# Altium footprint library CHIP-Library.PcbLib: 345 footprints (part 21 of 22)
Each footprint in its own frame and in the unit in brackets; x right, y up, seen from the top. Pads: shape width x height; smd on the part's side, far side on the other; paste and mask are expansions set on the pad; w line width, h text height; cw(c..) or ccw(c..) is an arc to the next point about the centre after c.
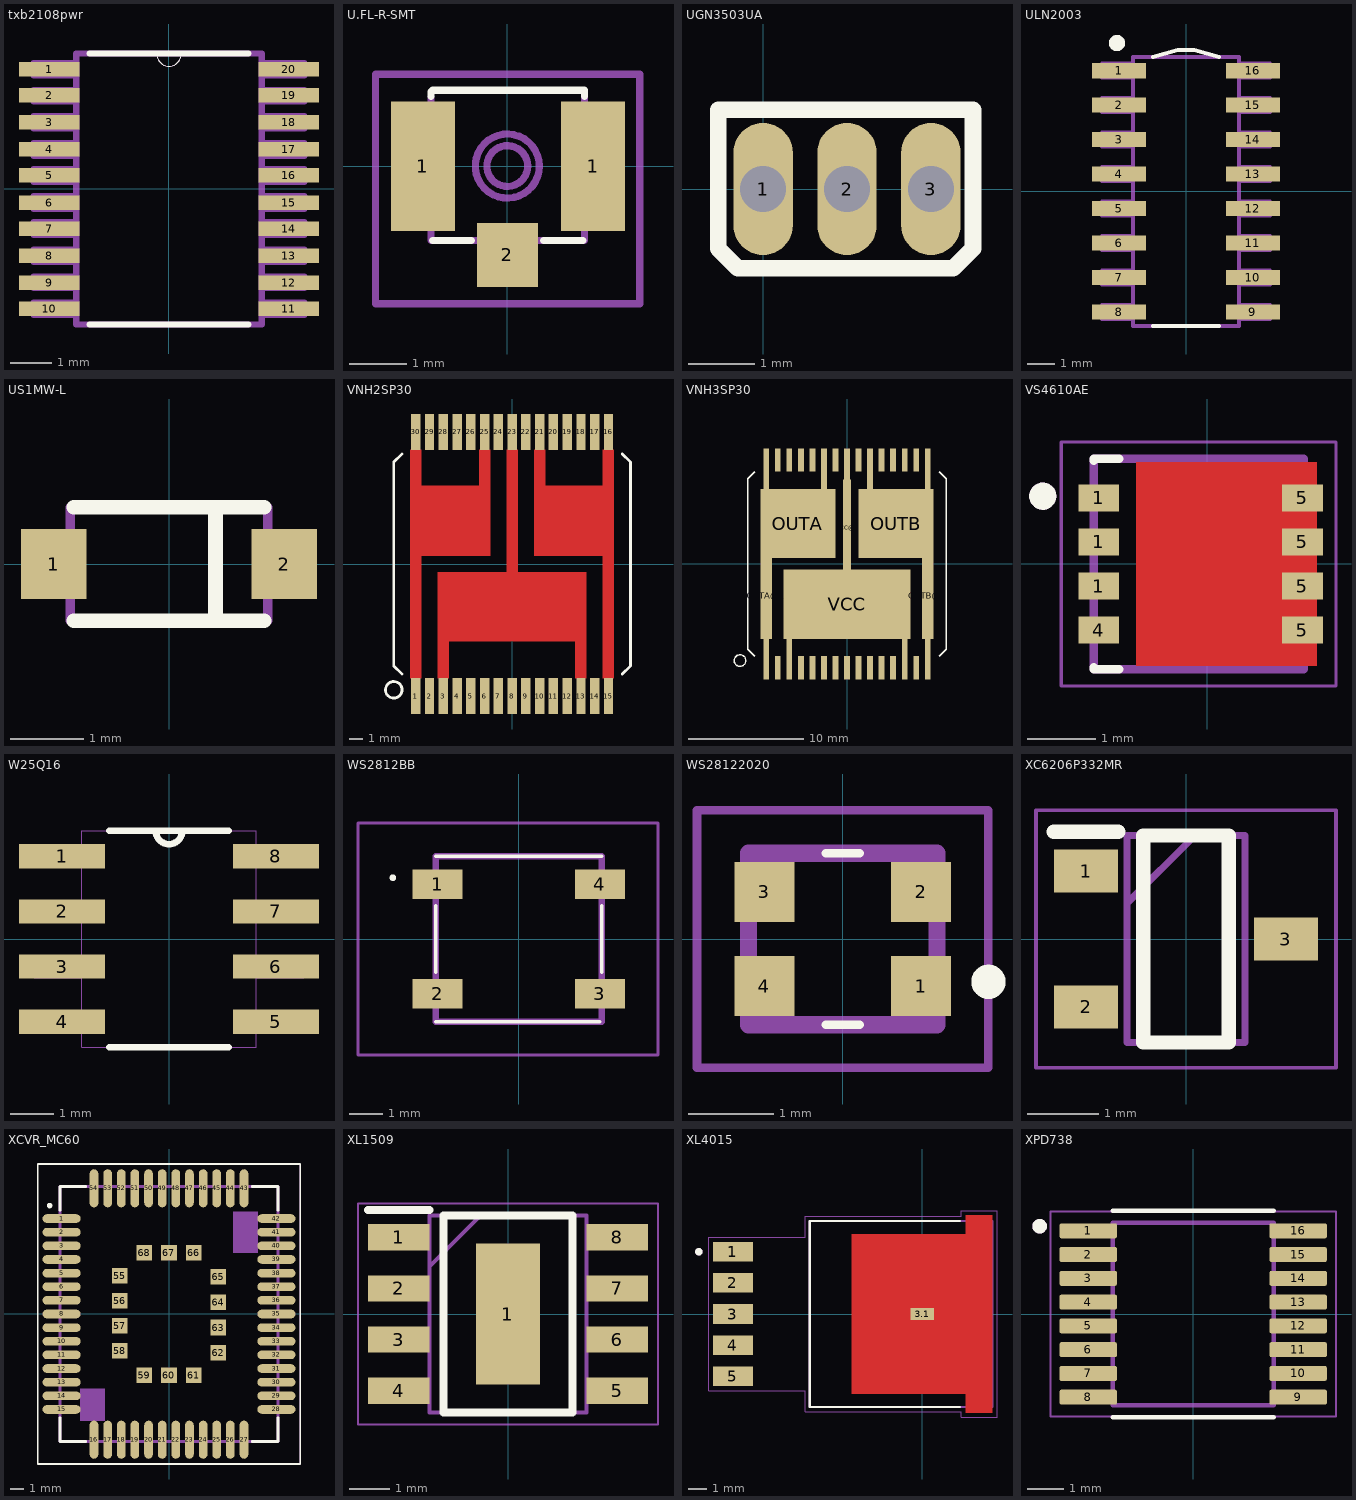
[diagram p20: the footprints below, top view; thin cyan lines are the x and y axes]

## txb2108pwr [mil]
pads (20):
  rect 58x14 smd: 1(-115,115) 2(-115,90) 3(-115,64) 4(-115,38) 5(-115,13) 6(-115,-13) 7(-115,-38) 8(-115,-64) 9(-115,-90) 10(-115,-115) 11(115,-115) 12(115,-90) 13(115,-64) 14(115,-38) 15(115,-13) 16(115,13) 17(115,38) 18(115,64) 19(115,90) 20(115,115)
Top Overlay:
  lines w0: -12,130 ccw(c0,130) 12,130
  lines w6: -76,-130 76,-130 ; -76,130 -12,130 12,130 76,130
Mechanical 1:
  lines w0: -12,130 ccw(c0,130) 12,130
  lines w6: -130,-121 -89,-121 -89,-109 -130,-109 -130,-121 ; -130,-95 -89,-95 -89,-84 -130,-84 -130,-95 ; -130,-70 -89,-70 -89,-58 -130,-58 -130,-70 ; -130,-44 -89,-44 -89,-32 -130,-32 -130,-44 ; -130,-19 -89,-19 -89,-7 -130,-7 -130,-19 ; -130,7 -89,7 -89,19 -130,19 -130,7 ; -130,32 -89,32 -89,44 -130,44 -130,32 ; -130,58 -89,58 -89,70 -130,70 -130,58 ; -130,84 -89,84 -89,95 -130,95 -130,84 ; -130,109 -89,109 -89,121 -130,121 -130,109 ; -89,-130 -89,130 -12,130 12,130 89,130 89,-130 -89,-130 ; 89,-121 130,-121 130,-109 89,-109 89,-121 ; 89,-95 130,-95 130,-84 89,-84 89,-95 ; 89,-70 130,-70 130,-58 89,-58 89,-70 ; 89,-44 130,-44 130,-32 89,-32 89,-44 ; 89,-19 130,-19 130,-7 89,-7 89,-19 ; 89,7 130,7 130,19 89,19 89,7 ; 89,32 130,32 130,44 89,44 89,32 ; 89,58 130,58 130,70 89,70 89,58 ; 89,84 130,84 130,95 89,95 89,84 ; 89,109 130,109 130,121 89,121 89,109

## U.FL-R-SMT [mil]
pads (3):
  rect 44x89 smd: 1(-58.07,0) 1(59,0)
  rect 42x44 smd: 2(0,-61.02)
Top Overlay:
  lines w5: -52.36,48 -52.36,51 ; -51.18,-51.18 -24.8,-51.18 ; -51.18,52 52,52 ; 25,-51.18 52,-51.18 ; 53,48 53,52
Mechanical 16:
  circle w5: c0,0 r14
  circle w5: c0,0 r22
  lines w5: -61.81,-35.04 -52.36,-35.04 -52.36,-35.43 ; -61.81,35 -52.36,35 ; -61.42,-35.43 -61.42,35 ; -52.36,-51.18 -52.36,47 ; -24.8,-51.18 25,-51.18 ; 53,-51.18 53,48 ; 53,-35.43 62,-35.43 62,35 55,35
Mechanical 27:
  lines w5: -90.55,-94.49 -90.55,63 91,63 91,-94.49 -90.55,-94.49
Mechanical 30:
  lines w5: -52.36,-51.18 -51.57,-51.18 ; 53,-35.83 53,-35.43

## UGN3503UA [mm] "TO-92"
height 22
pads (3):
  oval 0.9x2 hole 0.7: 1(0,0) 2(1.27,0) 3(2.54,0)
Top Overlay:
  lines w0.203: 0.127,-1.2 2.447,-1.2 ; 3.175,-0.11 3.175,1.2
  lines w0.254: -0.68,-0.901 -0.68,1.2 3.175,1.2 3.175,-0.901 2.876,-1.2 2.447,-1.2 -0.381,-1.2 -0.68,-0.901
3D body "TO-92.STEP": height 3.55, standoff -4.54, extent -0.78,-1.07 3.32,0.55

## ULN2003 [mil] "SOIC127P600X175-16N"
height 629.92
pads (16):
  rect 78x22 smd: 1(-97,175) 2(-97,125) 3(-97,75) 4(-97,25) 5(-97,-25) 6(-97,-75) 7(-97,-125) 8(-97,-175) 9(97,-175) 10(97,-125) 11(97,-75) 12(97,-25) 13(97,25) 14(97,75) 15(97,125) 16(97,175)
Top Overlay:
  circle w11.81: c-100,215 r5.91
  lines w6: -48,-195 48,-195 ; -48,195 -12,205 12,205 48,195
Mechanical 13:
  lines w6: -122,-185 -77,-185 -77,-165 -122,-165 -122,-185 ; -122,-135 -77,-135 -77,-115 -122,-115 -122,-135 ; -122,-85 -77,-85 -77,-65 -122,-65 -122,-85 ; -122,-35 -77,-35 -77,-15 -122,-15 -122,-35 ; -122,15 -77,15 -77,35 -122,35 -122,15 ; -122,65 -77,65 -77,85 -122,85 -122,65 ; -122,115 -77,115 -77,135 -122,135 -122,115 ; -122,165 -77,165 -77,185 -122,185 -122,165 ; -77,-195 -77,195 -12,195 12,195 77,195 77,-195 -77,-195 ; 77,-185 122,-185 122,-165 77,-165 77,-185 ; 77,-135 122,-135 122,-115 77,-115 77,-135 ; 77,-85 122,-85 122,-65 77,-65 77,-85 ; 77,-35 122,-35 122,-15 77,-15 77,-35 ; 77,15 122,15 122,35 77,35 77,15 ; 77,65 122,65 122,85 77,85 77,65 ; 77,115 122,115 122,135 77,135 77,115 ; 77,165 122,165 122,185 77,185 77,165
3D body "ULN2003AD.STEP": height 68.9, standoff 0, extent -118.11,-195 118.11,194.76

## US1MW-L [mm] "SOD-123"
pads (2):
  rect 0.9x0.95 smd: 1(-1.575,0) 2(1.575,0)
Top Overlay:
  lines w0.203: -1.3,-0.775 0.635,-0.775 0.635,0.775 -1.3,0.775 ; -0.5,-0.775 1.3,-0.775 ; -0.5,0.775 1.3,0.775
Mechanical 13:
  lines w0.127: -1.35,-0.775 -1.35,0.775 1.35,0.775 1.35,-0.775 -1.35,-0.775
3D body "CircuitWorks-SOD123.step": height 1.28, standoff 0.01, extent -1.85,-0.8 1.85,0.8

## VNH2SP30 [mm] "MULTIPOWER30"
pads (30):
  rect 0.68x2.6 smd: 1(-7,-9.6) 2(-6,-9.6) 3(-5,-9.6) 4(-4,-9.6) 5(-3,-9.6) 6(-2,-9.6) 7(-1,-9.6) 8(0,-9.6) 9(1,-9.6) 10(2,-9.6) 11(3,-9.6) 12(4,-9.6) 13(5,-9.6) 14(6,-9.6) 15(7,-9.6) 16(7,9.6) 17(6,9.6) 18(5,9.6) 19(4,9.6) 20(3,9.6) 21(2,9.6) 22(1,9.6) 23(0,9.6) 24(-1,9.6) 25(-2,9.6) 26(-3,9.6) 27(-4,9.6) 28(-5,9.6) 29(-6,9.6) 30(-7,9.6)
Top Layer:
  region: 5.4,-5.6 4.602,-5.6 4.602,-5.605 -4.6,-5.605 -4.6,-5.6 -5.405,-5.6 -5.405,-0.6 -0.4,-0.6 -0.4,-0.601 0.4,-0.601 0.4,-0.6 5.4,-0.6
  region: 7.4,0.601 1.603,0.601 1.603,5.7 7.4,5.7
  region: -1.6,0.601 -7.413,0.601 -7.413,5.7 -1.6,5.7
  region: -6.6,-8.303 -7.402,-8.303 -7.402,0.6 -6.6,0.6
  region: 7.4,-8.3 6.6,-8.3 6.6,0.6 7.4,0.6
  region: -6.6,5.704 -7.405,5.704 -7.405,8.3 -6.6,8.3
  region: 7.4,5.702 6.602,5.702 6.602,8.3 7.4,8.3
  region: 2.4,5.703 1.601,5.703 1.601,8.3 2.4,8.3
  region: -1.6,5.701 -2.4,5.701 -2.4,8.3 -1.6,8.3
  region: 0.4,-0.601 -0.4,-0.601 -0.4,8.3 0.4,8.3
  region: 5.4,-8.304 4.602,-8.304 4.602,-5.6 5.4,-5.6
  region: -4.6,-8.316 -5.41,-8.316 -5.41,-5.6 -4.6,-5.6
Top Overlay:
  circle w0.203: c-8.6,-9.144 r0.6
  lines w0.203: -8,-8 -8.6,-7.4 -8.6,7.4 -8,8 ; 8,-8 8.6,-7.4 8.6,7.4 8,8

## VNH3SP30 [mm] "Motor Driver Power MOSFET Parallel, PWM MultiPowerSO-30"
pads (36):
  rect 0.508x12 smd paste-7 mask+0: 1(-7,-4) 15(7,-4) 16(7,4) 30(-7,4)
  rect 0.508x2 smd: 2(-6,-9) 4(-4,-9) 5(-3,-9) 6(-2,-9) 7(-1,-9) 8(0,-9) 9(1,-9) 10(2,-9) 11(3,-9) 12(4,-9) 14(6,-9) 17(6,9) 18(5,9) 19(4,9) 20(3,9) 22(1,9) 24(-1,9) 26(-3,9) 27(-4,9) 28(-5,9) 29(-6,9)
  rect 0.508x4 smd paste-3 mask+0: 3(-5,-8) 13(5,-8) 21(2,8) 23(0,8) 25(-2,8)
  rect 6.5x6 smd paste-4 mask+0: OUTA(-4.25,3.5) OUTB(4.25,3.5)
  rect 1x7.5 smd paste-5 mask+0: OUTA@1(-7,-2.755) OUTB@1(7,-2.755)
  rect 11x6 smd paste-7 mask+0: VCC(0,-3.5)
  rect 0.65x8.3 smd paste-5 mask+0: VCC@1(0,3.145)
Top Overlay:
  circle w0.127: c-9.271,-8.382 r0.5
  lines w0.127: -8,-8 -8.6,-7.4 -8.6,7.4 -8,8 ; 8,-8 8.6,-7.4 8.6,7.4 8,8
Top Paste:
  circle w0: c-6,5.5 r0.3
  circle w0: c-4,5.5 r0.3
  circle w0: c-2,5.5 r0.3
  circle w0: c2,5.5 r0.3
  circle w0: c4,5.5 r0.3
  circle w0: c6,5.5 r0.3
  circle w0: c-6,3.5 r0.3
  circle w0: c-4,3.5 r0.3
  circle w0: c-2,3.5 r0.3
  circle w0: c2,3.5 r0.3
  circle w0: c4,3.5 r0.3
  circle w0: c6,3.5 r0.3
  circle w0: c-6,1.5 r0.3
  circle w0: c-4,1.5 r0.3
  circle w0: c-2,1.5 r0.3
  circle w0: c2,1.5 r0.3
  circle w0: c4,1.5 r0.3
  circle w0: c6,1.5 r0.3
  circle w0: c-4,-1.5 r0.3
  circle w0: c-2,-1.5 r0.3
  circle w0: c0,-1.5 r0.3
  circle w0: c2,-1.5 r0.3
  circle w0: c4,-1.5 r0.3
  circle w0: c-4,-3.5 r0.3
  circle w0: c-2,-3.5 r0.3
  circle w0: c0,-3.5 r0.3
  circle w0: c2,-3.5 r0.3
  circle w0: c4,-3.5 r0.3
  circle w0: c-4,-5.5 r0.3
  circle w0: c-2,-5.5 r0.3
  circle w0: c0,-5.5 r0.3
  circle w0: c2,-5.5 r0.3
  circle w0: c4,-5.5 r0.3
  region: -6.75,8.006 -7.26,8.006 -7.26,9.995 -6.75,9.995
  region: -1.75,8.005 -2.253,8.005 -2.253,9.995 -1.75,9.995
  region: 0.25,8.003 -0.25,8.003 -0.25,9.995 0.25,9.995
  region: 2.25,7.999 1.751,7.999 1.751,9.995 2.25,9.995
  region: 7.25,7.996 6.751,7.996 6.751,9.995 7.25,9.995
  region: -6.75,-10 -7.253,-10 -7.253,-7.995 -6.75,-7.995
  region: -4.75,-9.996 -5.251,-9.996 -5.251,-7.995 -4.75,-7.995
  region: 5.25,-9.996 4.751,-9.996 4.751,-7.995 5.25,-7.995
  region: 7.25,-10.014 6.763,-10.014 6.763,-7.995 7.25,-7.995
Top Solder:
  circle w0: c-6,5.5 r0.4
  circle w0: c-4,5.5 r0.4
  circle w0: c-2,5.5 r0.4
  circle w0: c2,5.5 r0.4
  circle w0: c4,5.5 r0.4
  circle w0: c6,5.5 r0.4
  circle w0: c-6,3.5 r0.4
  circle w0: c-4,3.5 r0.4
  circle w0: c-2,3.5 r0.4
  circle w0: c2,3.5 r0.4
  circle w0: c4,3.5 r0.4
  circle w0: c6,3.5 r0.4
  circle w0: c-6,1.5 r0.4
  circle w0: c-4,1.5 r0.4
  circle w0: c-2,1.5 r0.4
  circle w0: c2,1.5 r0.4
  circle w0: c4,1.5 r0.4
  circle w0: c6,1.5 r0.4
  circle w0: c-4,-1.5 r0.4
  circle w0: c-2,-1.5 r0.4
  circle w0: c0,-1.5 r0.4
  circle w0: c2,-1.5 r0.4
  circle w0: c4,-1.5 r0.4
  circle w0: c-4,-3.5 r0.4
  circle w0: c-2,-3.5 r0.4
  circle w0: c0,-3.5 r0.4
  circle w0: c2,-3.5 r0.4
  circle w0: c4,-3.5 r0.4
  circle w0: c-4,-5.5 r0.4
  circle w0: c-2,-5.5 r0.4
  circle w0: c0,-5.5 r0.4
  circle w0: c2,-5.5 r0.4
  circle w0: c4,-5.5 r0.4
  region: -6.65,7.896 -7.351,7.896 -7.351,10.095 -6.65,10.095
  region: -1.65,7.902 -2.352,7.902 -2.352,10.095 -1.65,10.095
  region: 0.35,7.906 -0.35,7.906 -0.35,10.095 0.35,10.095
  region: 2.35,7.909 1.653,7.909 1.653,10.095 2.35,10.095
  region: 7.35,7.898 6.653,7.898 6.653,10.095 7.35,10.095
  region: -6.65,-10.096 -7.351,-10.096 -7.351,-7.895 -6.65,-7.895
  region: -4.65,-10.108 -5.357,-10.108 -5.357,-7.895 -4.65,-7.895
  region: 5.35,-10.115 4.659,-10.115 4.659,-7.895 5.35,-7.895
  region: 7.35,-10.098 6.652,-10.098 6.652,-7.895 7.35,-7.895
3D body "VNH3SP30-E.STEP": height 2.37, standoff 0.03, extent -8.6,-9.627 8.6,9.373

## VS4610AE [mm] "DFN_3*3"
pads (8):
  rect 0.6x0.4 smd: 1(-1.602,-0.325) 1(-1.602,0.975) 1(-1.602,0.325) 4(-1.602,-0.975) 5(1.403,-0.975) 5(1.403,0.325) 5(1.403,-0.325) 5(1.403,0.975)
Top Layer:
  rectangle: -1.052,-1.505 1.618,1.505
Top Overlay:
  circle w0.2: c-2.427,1 r0.1
  lines w0.127: -1.677,-1.525 -1.677,-1.55 -1.302,-1.55 ; -1.677,1.525 -1.677,1.55 -1.302,1.55
Top Paste:
  region: 0.123,0.42 -0.757,0.42 -0.757,1.11 0.123,1.11
  region: 1.203,0.42 0.323,0.42 0.323,1.11 1.203,1.11
  region: 0.123,-1.11 -0.757,-1.11 -0.757,-0.42 0.123,-0.42
  region: 1.203,-1.11 0.323,-1.11 0.323,-0.42 1.203,-0.42
  region: 1.648,0.775 1.403,0.775 1.403,1.175 1.648,1.175
  region: 1.648,0.125 1.403,0.125 1.403,0.525 1.648,0.525
  region: 1.648,-0.525 1.403,-0.525 1.403,-0.125 1.648,-0.125
  region: 1.648,-1.175 1.403,-1.175 1.403,-0.775 1.648,-0.775
Top Solder:
  region: 1.498,1.275 1.748,1.275 1.748,0.675 1.498,0.675 1.498,0.625 1.748,0.625 1.748,0.025 -1.052,0.025 -1.052,1.505 1.498,1.505
  region: 1.748,-0.625 1.498,-0.625 1.498,-0.675 1.748,-0.675 1.748,-1.275 1.498,-1.275 1.498,-1.505 -1.052,-1.505 -1.052,0.42 1.748,0.42
Mechanical 13:
  circle w0.2: c-2.427,1 r0.1
  lines w0.127: -1.677,-1.55 -1.677,1.55 1.423,1.55 1.423,-1.55 -1.677,-1.55
Mechanical 15:
  lines w0.05: -2.152,-1.8 -2.152,1.8 1.898,1.8 1.898,-1.8 -2.152,-1.8
3D body "step_temp.STEP": height 0.8, standoff 0, extent -1.802,-1.6 1.548,1.6

## W25Q16 [mil]
pads (8):
  rect 78x22 smd: 1(-97,75) 2(-97,25) 3(-97,-25) 4(-97,-75) 5(97,-75) 6(97,-25) 7(97,25) 8(97,75)
Top Overlay:
  lines w6: -54,-98 54,-98 ; -54,98 -12,98 ; 54,98 12,98 ; -12,98 ccw(c0,98) 12,98 ; -12,98 12,98
Mechanical 4:
  lines w0: -122,-85 -79,-85 ; -122,-85 -122,-65 ; -122,-85 -79,-85 ; -122,-85 -122,-65 ; -122,-65 -79,-65 ; -122,-65 -79,-65 ; -122,-35 -79,-35 ; -122,-35 -122,-15 ; -122,-35 -79,-35 ; -122,-35 -122,-15 ; -122,-15 -79,-15 ; -122,-15 -79,-15 ; -122,15 -79,15 ; -122,15 -122,35 ; -122,15 -79,15 ; -122,15 -122,35 ; -122,35 -79,35 ; -122,35 -79,35 ; -122,65 -79,65 ; -122,65 -122,85 ; -122,65 -79,65 ; -122,65 -122,85 ; -122,85 -79,85 ; -122,85 -79,85 ; -79,-98 -79,98 ; -79,-98 79,-98 ; -79,-98 -79,98 ; -79,-98 79,-98 ; -79,-85 -79,-65 ; -79,-85 -79,-65 ; -79,-35 -79,-15 ; -79,-35 -79,-15 ; -79,15 -79,35 ; -79,15 -79,35 ; -79,65 -79,85 ; -79,65 -79,85 ; -79,98 -12,98 ; -79,98 -12,98 ; -12,98 ccw(c0,98) 12,98 ; -12,98 ccw(c0,98) 12,98 ; -12,98 12,98 ; -12,98 12,98 ; 12,98 79,98 ; 12,98 79,98 ; 79,-98 79,98 ; 79,-98 79,98 ; 79,-85 122,-85 ; 79,-85 79,-65 ; 79,-85 122,-85 ; 79,-85 79,-65 ; 79,-65 122,-65 ; 79,-65 122,-65 ; 79,-35 122,-35 ; 79,-35 79,-15 ; 79,-35 122,-35 ; 79,-35 79,-15 ; 79,-15 122,-15 ; 79,-15 122,-15 ; 79,15 122,15 ; 79,15 79,35 ; 79,15 122,15 ; 79,15 79,35 ; 79,35 122,35 ; 79,35 122,35 ; 79,65 122,65 ; 79,65 79,85 ; 79,65 122,65 ; 79,65 79,85 ; 79,85 122,85 ; 79,85 122,85 ; 122,-85 122,-65 ; 122,-85 122,-65 ; 122,-35 122,-15 ; 122,-35 122,-15 ; 122,15 122,35 ; 122,15 122,35 ; 122,65 122,85 ; 122,65 122,85
3D body "MAX1562ESA+--3DModel-STEP-56544.STEP": height 59.56, standoff -9.34, extent -118.1,-96.46 118.11,96.45

## WS2812BB [mm]
pads (4):
  rect 1.5x0.9 smd: 1(-2.45,1.65) 2(-2.45,-1.65) 3(2.45,-1.65) 4(2.45,1.65)
Top Overlay:
  lines w0.1: -2.5,-2.5 2.45,-2.5 ; -2.5,-1 -2.5,1 ; -2.5,2.5 2.5,2.5 ; 2.5,-1 2.5,1 ; -3.8,1.8 cw(c-3.8,1.85) -3.8,1.9 cw(c-3.8,1.85) -3.8,1.8
Mechanical 13:
  lines w0.2: -2.5,-2.5 -2.5,2.5 2.5,2.5 2.5,-2.5 -2.5,-2.5
Mechanical 15:
  lines w0.1: -4.85,-3.5 -4.85,3.5 4.2,3.5 4.2,-3.5 -4.85,-3.5
3D body "WS2812B-B.stp": height 1.72, standoff 0, extent -2.5,-2.5 2.5,2.5

## WS28122020 [mm]
pads (4):
  rect 0.7x0.7 smd: 1(0.915,-0.55) 2(0.915,0.55) 3(-0.915,0.55) 4(-0.915,-0.55)
Top Overlay:
  lines w0.1: -0.2,-1 0.2,-1 ; -0.2,1 0.2,1
  lines w0.2: 1.7,-0.6 cw(c1.7,-0.5) 1.7,-0.4 cw(c1.7,-0.5) 1.7,-0.6
Top Courtyard:
  lines w0.2: -1.1,-1 1.1,-1 1.1,1 -1.1,1 -1.1,-1
Mechanical 13:
  lines w0.2: -1.1,-1 1.1,-1 1.1,1 -1.1,1 -1.1,-1
Mechanical 15:
  lines w0.1: -1.7,-1.5 1.7,-1.5 1.7,1.5 -1.7,1.5 -1.7,-1.5
3D body "WS2812-2020.stp": height 0.94, standoff 0, extent -1.1,-1 1.1,1

## XC6206P332MR [mm]
pads (3):
  rect 0.9x0.6 smd: 1(-1.4,0.95) 2(-1.4,-0.95) 3(1.4,0)
Top Overlay:
  lines w0.2: -1.85,1.5 -0.95,1.5 ; -0.6,-1.45 -0.6,1.45 0.6,1.45 0.6,-1.45 -0.6,-1.45
Mechanical 13:
  lines w0.1: -0.825,0.5 0.125,1.45 ; -0.825,-1.45 -0.825,1.45 0.825,1.45 0.825,-1.45 -0.825,-1.45
Mechanical 15:
  lines w0.05: -2.1,-1.8 -2.1,1.8 2.1,1.8 2.1,-1.8 -2.1,-1.8
3D body "XC6206P332MR.stp": height 1.3, standoff 0, extent -1.4,-1.45 1.4,1.45

## XCVR_MC60 [mil]
pads (68):
  oval 110x25 smd: 1(-310,275.59) 2(-310,236.22) 3(-310,196.85) 4(-310,157.48) 5(-310,118.11) 6(-310,78.74) 7(-310,39.37) 8(-310,0) 9(-310,-39.37) 10(-310,-78.74) 11(-310,-118.11) 12(-310,-157.48) 13(-310,-196.85) 14(-310,-236.22) 15(-310,-275.59) 28(310,-275.59) 29(310,-236.22) 30(310,-196.85) 31(310,-157.48) 32(310,-118.11) 33(310,-78.74) 34(310,-39.37) 35(310,0) 36(310,39.37) 37(310,78.74) 38(310,118.11) 39(310,157.48) 40(310,196.85) 41(310,236.22) 42(310,275.59)
  oval 25x110 smd: 16(-216.54,-363) 17(-177.17,-363) 18(-137.8,-363) 19(-98.43,-363) 20(-59.05,-363) 21(-19.68,-363) 22(19.69,-363) 23(59.06,-363) 24(98.43,-363) 25(137.8,-363) 26(177.17,-363) 27(216.54,-363) 43(216.54,363) 44(177.17,363) 45(137.8,363) 46(98.43,363) 47(59.06,363) 48(19.69,363) 49(-19.68,363) 50(-59.05,363) 51(-98.43,363) 52(-137.8,363) 53(-177.17,363) 54(-216.54,363)
  rect 45x45 smd: 55(-142,111) 56(-142,38) 57(-142,-34) 58(-142,-106.3) 59(-70.87,-177.17) 60(0,-177.17) 61(70.87,-177.17) 62(142,-112) 63(142,-39) 64(142,34) 65(142,107) 66(70.87,177.16) 67(0,177.16) 68(-70.87,177.16)
Top Overlay:
  circle w7.87: c-344.49,312.99 r3.94
  lines w5: -379,-433 -379,433 379,433 379,-433 -379,-433
  lines w7.87: -314.96,-299.21 -314.96,-368.11 -240.16,-368.11 ; -314.96,299.21 -314.96,368.11 -240.16,368.11 ; 240.16,-368.11 314.96,-368.11 314.96,-299.21 ; 240.16,368.11 314.96,368.11 314.96,299.21
Mechanical 1:
  region: 185.07,295.28 255.91,295.28 255.91,177.19 185.07,177.19
  region: -256.4,-216.54 -185.04,-216.54 -185.04,-307.68 -256.4,-307.68
  region: 185.05,295.28 255.91,295.28 255.91,177.18 185.05,177.18
  region: -256.08,-216.54 -185.04,-216.54 -185.04,-307.3 -256.08,-307.3
  region: -256.41,-216.54 -185.04,-216.54 -185.04,-307.69 -256.41,-307.69
  region: 185.15,295.28 255.91,295.28 255.91,177.27 185.15,177.27
  lines w7.87: -314.96,-368.11 -314.96,368.11 314.96,368.11 314.96,-368.11 -314.96,-368.11
Mechanical 4:
  lines w1.97: -378.94,-433.07 -378.94,433.07 378.94,433.07 378.94,-433.07 -378.94,-433.07
3D body "User Library-Quectel MC60.step": height 82.68, standoff -0.04, extent -315.01,-368.16 315.01,368.16

## XL1509 [mm]
pads (9):
  rect 1.525x0.65 smd paste-2539.97: 1(-2.712,1.905) 2(-2.712,0.635) 3(-2.712,-0.635) 4(-2.712,-1.905) 5(2.712,-1.905) 6(2.712,-0.635) 7(2.712,0.635) 8(2.712,1.905)
  rect 1.6x3.5 smd paste-2539.97: 1(0,0)
Top Overlay:
  lines w0.2: -3.475,2.58 -1.95,2.58 ; -1.6,-2.45 -1.6,2.45 1.6,2.45 1.6,-2.45 -1.6,-2.45
Top Paste:
  rectangle: -0.738,0.933 0.762,1.333
  rectangle: -0.738,-1.48 0.762,-1.08
  rectangle: -0.738,-0.676 0.762,-0.276
  rectangle: -0.738,0.129 0.762,0.529
  region: 1.95,1.655 1.95,2.155 3.475,2.155 3.475,1.655
  region: 1.95,0.385 1.95,0.885 3.475,0.885 3.475,0.385
  region: 1.95,-0.885 1.95,-0.385 3.475,-0.385 3.475,-0.885
  region: 1.95,-2.155 1.95,-1.655 3.475,-1.655 3.475,-2.155
  region: -3.475,-2.155 -3.475,-1.655 -1.95,-1.655 -1.95,-2.155
  region: -3.475,-0.885 -3.475,-0.385 -1.95,-0.385 -1.95,-0.885
  region: -3.475,0.385 -3.475,0.885 -1.95,0.885 -1.95,0.385
  region: -3.475,1.655 -3.475,2.155 -1.95,2.155 -1.95,1.655
Mechanical 13:
  lines w0.1: -1.95,1.18 -0.68,2.45 ; -1.95,-2.45 -1.95,2.45 1.95,2.45 1.95,-2.45 -1.95,-2.45
Mechanical 15:
  lines w0.05: -3.725,-2.75 -3.725,2.75 3.725,2.75 3.725,-2.75 -3.725,-2.75
3D body "FR9886SOGTR.stp": height 1.75, standoff 0, extent -3,-2.45 3,2.45

## XL4015 [mm]
pads (6):
  rect 2.16x1.07 smd: 1(-10.335,3.4) 2(-10.335,1.7) 3(-10.335,0) 4(-10.335,-1.7) 5(-10.335,-3.4)
  rect 1.27x0.635 smd paste-2 mask+0: 3.1(0,0)
Top Layer:
  region: 3.835,-5.4 2.365,-5.4 2.365,-4.35 -3.835,-4.35 -3.835,4.35 2.365,4.35 2.365,5.4 3.835,5.4
Top Overlay:
  circle w0.2: c-12.2,3.4 r0.1
  lines w0.127: 2.05,-5.08 -6.135,-5.08 -6.135,5.08 2.05,5.08
Top Paste:
  region: -0.6,0.88 -3.2,0.88 -3.2,3.48 -0.6,3.48
  region: 3.2,-3.48 0.6,-3.48 0.6,-0.88 3.2,-0.88
  region: -0.6,-3.48 -3.2,-3.48 -3.2,-0.88 -0.6,-0.88
  region: 3.2,0.88 0.6,0.88 0.6,3.48 3.2,3.48
Top Solder:
  region: 3.935,-5.5 2.265,-5.5 2.265,-4.45 -3.935,-4.45 -3.935,4.45 2.265,4.45 2.265,5.5 3.935,5.5
Mechanical 13:
  circle w0.2: c-12.2,3.4 r0.1
  lines w0.127: -6.135,-5.08 3.835,-5.08 3.835,5.08 -6.135,5.08 -6.135,-5.08
Mechanical 15:
  lines w0.05: -11.665,-4.185 -6.385,-4.185 -6.385,-5.33 2.12,-5.33 2.12,-5.65 4.085,-5.65 4.085,5.65 2.12,5.65 2.12,5.33 -6.385,5.33 -6.385,4.185 -11.665,4.185 -11.665,-4.185
3D body "User Library-TO-263 5Ld.step": height 4.57, standoff -0.01, extent -11.085,-5.08 3.556,5.08

## XPD738 [mm] "TSSOP-16"
height 1.2
pads (16):
  rrect25% 1.57x0.41 smd paste+0 mask+0.102: 1(-2.87,2.275) 2(-2.87,1.625) 3(-2.87,0.975) 4(-2.87,0.325) 5(-2.87,-0.325) 6(-2.87,-0.975) 7(-2.87,-1.625) 8(-2.87,-2.275) 9(2.87,-2.275) 10(2.87,-1.625) 11(2.87,-0.975) 12(2.87,-0.325) 13(2.87,0.325) 14(2.87,0.975) 15(2.87,1.625) 16(2.87,2.275)
Top Overlay:
  circle w0.2: c-4.2,2.4 r0.1
  lines w0.127: -2.2,-2.82 2.2,-2.82 ; -2.2,2.82 2.2,2.82
Mechanical 13:
  circle w0.2: c-4.2,2.4 r0.1
  lines w0.127: -2.2,-2.5 -2.2,2.5 2.2,2.5 2.2,-2.5 -2.2,-2.5
Mechanical 15:
  lines w0.05: -3.905,-2.8 -3.905,2.8 3.905,2.8 3.905,-2.8 -3.905,-2.8
3D body "step_temp.STEP": height 1.2, standoff 0, extent -3.2,-2.5 3.2,2.5